# Altium footprint library FootPrintLib_9.PcbLib: 287 footprints (part 6 of 18)
Each footprint in its own frame and in the unit in brackets; x right, y up, seen from the top. Pads: shape width x height; smd on the part's side, far side on the other; paste and mask are expansions set on the pad; w line width, h text height; cw(c..) or ccw(c..) is an arc to the next point about the centre after c.
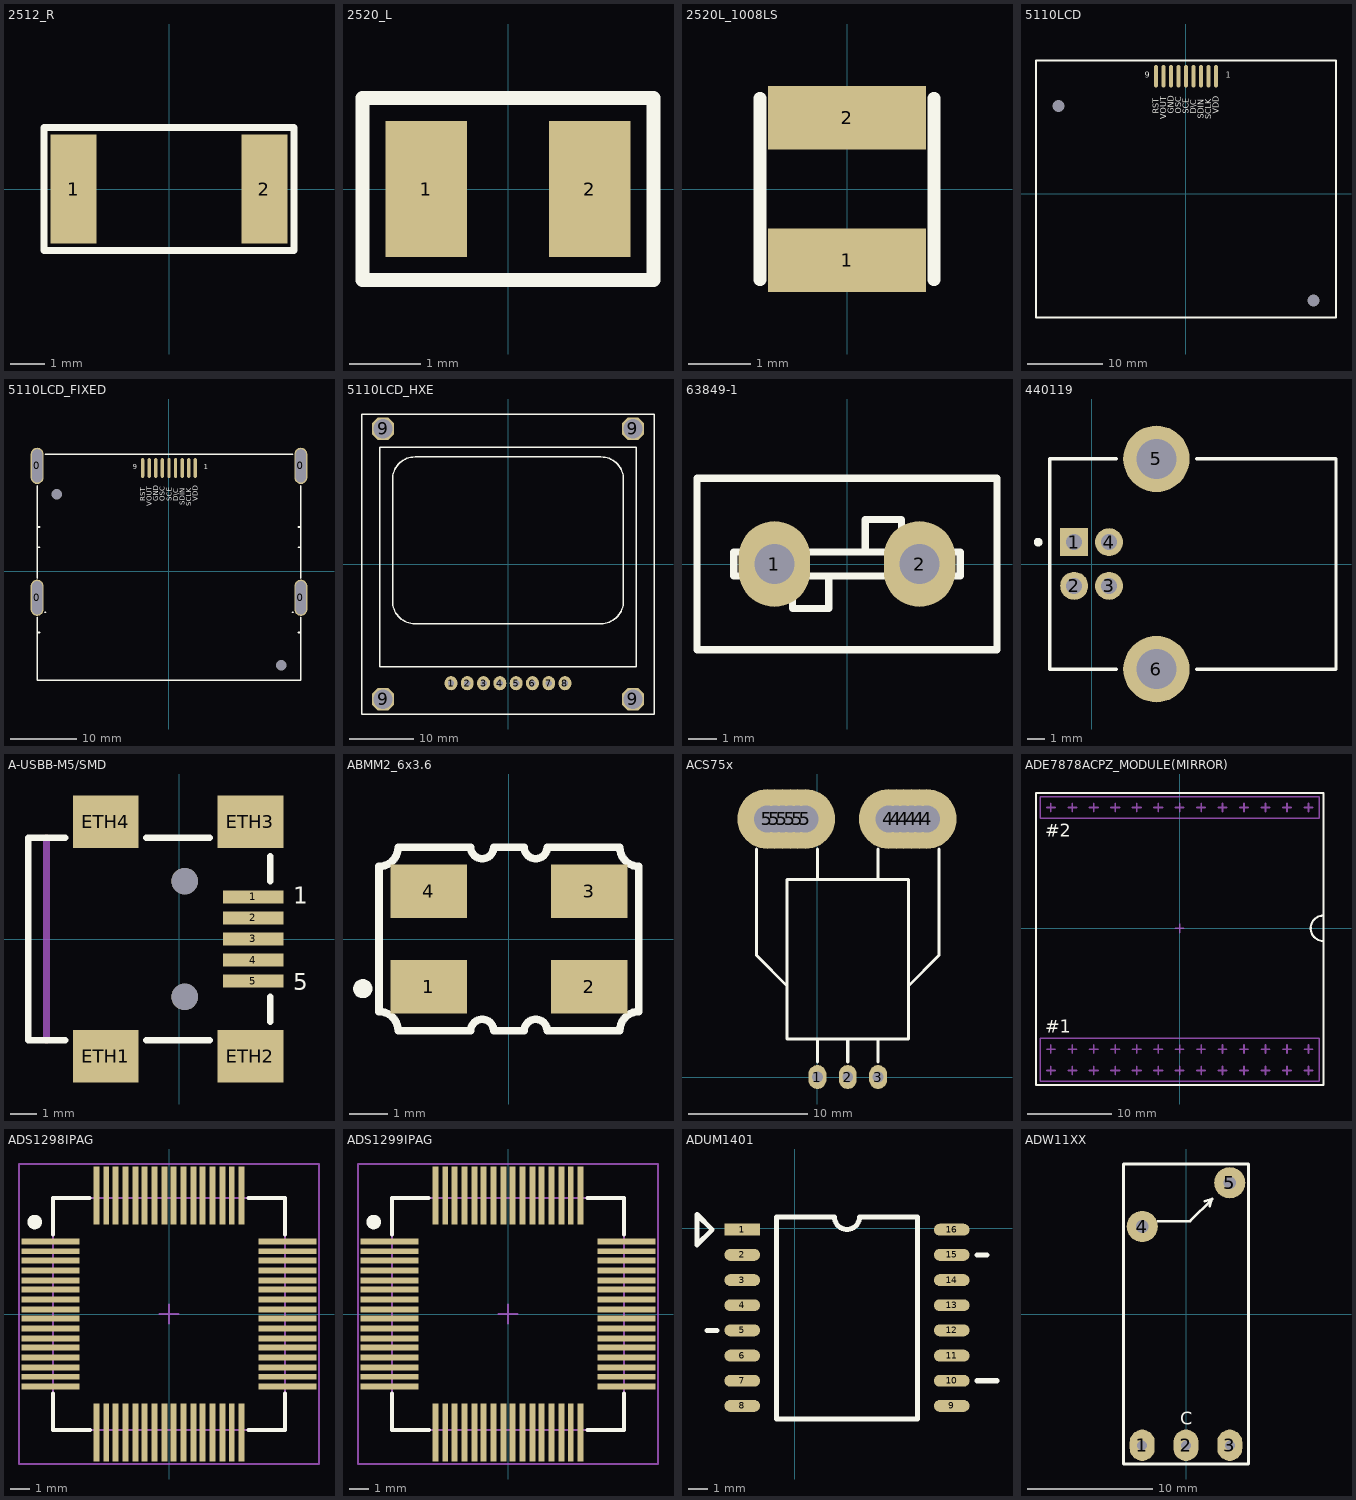
[diagram p5: the footprints below, top view; thin cyan lines are the x and y axes]

## 2512_R [mm] "Resistor"
pads (2):
  rect 1.35x3.2 smd: 1(-2.794,0) 2(2.794,0)
Top Overlay:
  lines w0.2: -3.658,-1.8 -3.658,1.803 3.658,1.803 3.658,-1.8 -3.658,-1.8
3D body "User Library-R_2512.STEP": height 0.6, standoff 0, extent -3.2,-1.6 3.2,1.6

## 2520_L [mil]
pads (2):
  rect 45x75 smd: 1(-45,0) 2(45,0)
Top Overlay:
  lines w7.87: -80,-50 80,-50 80,50 -80,50 -80,-50
3D body "User Library-Chip Resistor2RESC2525X63N.STEP": height 24.8, standoff 0, extent -49.21,-49.21 49.22,49.22

## 2520L_1008LS [mm] "Inductor"
height 2.03
pads (2):
  rect 2.54x1.02 smd: 1(0,-1.145) 2(0,1.145)
Top Overlay:
  lines w0.203: -1.4,-1.46 -1.4,1.46 ; 1.4,-1.46 1.4,1.46
3D body "User Library-Ind1206.STEP": height 1.7, standoff -0.1, extent -0.808,-1.7 0.808,1.7

## 5110LCD [mm]
pads (11):
  round 0 on Mech1 hole 1.6: 0(-16.958,11.689) 0(17.06,-14.215)
  oval 0.5x3 smd: 1(4.06,15.685) 2(3.06,15.685) 3(2.06,15.685) 4(1.06,15.685) 5(0.06,15.685) 6(-0.94,15.685) 7(-1.94,15.685) 8(-2.94,15.685) 9(-3.94,15.685)
Top Overlay:
  lines w0.254: -19.94,-16.515 20.06,-16.515 20.06,17.785 -19.94,17.785 -19.94,-16.515
  text "9" at -5.461,15.494 h0.76
  text "1" at 5.334,15.494 h0.76
  text "RST" at -3.556,10.668 h0.76
  text "VOUT" at -2.556,9.906 h0.76
  text "GND" at -1.556,10.668 h0.76
  text "OSC" at -0.556,10.668 h0.76
  text "SCE" at 0.445,10.668 h0.76
  text "D\C" at 1.445,10.668 h0.76
  text "SDIN" at 2.445,10.033 h0.76
  text "SCLK" at 3.445,9.906 h0.76
  text "VDD" at 4.445,10.668 h0.76
3D body: height 2.8, standoff 0, extent -19.685,-16.256 19.812,17.526

## 5110LCD_FIXED [mm]
pads (15):
  oval 2x5.5 hole 1.5 slot 5 at 90 deg: 0(-19.939,-3.998) 0(-19.939,16.002) 0(20.066,-3.998) 0(20.066,16.002)
  round 0 on Mech1 hole 1.6: 0(-16.958,11.689) 0(17.06,-14.215)
  oval 0.5x3 smd: 1(4.06,15.685) 2(3.06,15.685) 3(2.06,15.685) 4(1.06,15.685) 5(0.06,15.685) 6(-0.94,15.685) 7(-1.94,15.685) 8(-2.94,15.685) 9(-3.94,15.685)
Top Overlay:
  lines w0.254: -19.94,-6.985 -19.94,-16.515 20.06,-16.515 20.06,-6.985 ; -19.94,-1.016 -19.94,12.954 ; -19.939,-9.271 -19.558,-9.271 ; -19.939,3.683 -19.558,3.683 ; -19.939,6.731 -19.558,6.731 ; -18.796,-6.223 -18.669,-6.223 ; -18.669,17.78 18.796,17.78 ; 18.796,-6.223 18.923,-6.223 ; 19.685,-9.271 20.066,-9.271 ; 19.685,3.683 19.939,3.683 ; 19.685,6.731 19.939,6.731 ; 20.06,12.954 20.068,-1.016
  text "9" at -5.461,15.494 h0.76
  text "1" at 5.334,15.494 h0.76
  text "RST" at -3.556,10.668 h0.76
  text "VOUT" at -2.556,9.906 h0.76
  text "GND" at -1.556,10.668 h0.76
  text "OSC" at -0.556,10.668 h0.76
  text "SCE" at 0.445,10.668 h0.76
  text "D\C" at 1.445,10.668 h0.76
  text "SDIN" at 2.445,10.033 h0.76
  text "SCLK" at 3.445,9.906 h0.76
  text "VDD" at 4.445,10.668 h0.76
3D body: height 2.8, standoff 0, extent -19.685,-16.256 19.812,17.526

## 5110LCD_HXE [mm] "LCD Nokia5110 Module 45/6x46/8mm"
height 6.5
pads (12):
  oval 2x2.2 hole 1: 1(-8.89,-18.6) 2(-6.35,-18.6) 3(-3.81,-18.6) 4(-1.27,-18.6) 5(1.27,-18.6) 6(3.81,-18.6) 7(6.35,-18.6) 8(8.89,-18.6)
  oct 3.5x3.5 hole 3: 9(-19.5,-21.1) 9(-19.5,21.1) 9(19.5,-21.1) 9(19.5,21.1)
Top Overlay:
  lines w0.2: -18,-5.815 ccw(c-14.515,-5.815) -14.515,-9.3 14.5,-9.3 ccw(c14.5,-5.8) 18,-5.8 18,13.2 ccw(c14.5,13.2) 14.5,16.7 -14.5,16.7 ccw(c-14.5,13.2) -18,13.2 -18,-5.8 ; -22.8,-23.4 -22.8,23.4 22.8,23.4 22.8,-23.4 -22.8,-23.4 ; -20,-16 20,-16 20,18.2 -20,18.2 -20,-16
3D body: height 1.9, standoff 0, extent 16.3,16.3 16.3,16.3
3D body: height 1.9, standoff 0, extent 16.3,16.3 16.3,16.3
3D body "5110_V3.step": height 7.3, standoff -5.67, extent -22.8,-23.4 22.8,23.4

## 63849-1 [mm] "Terminals TAB .250 PCB"
height 10.21
pads (2):
  oval 2.5x3 hole 1.4: 1(-2.54,0) 2(2.54,0)
Top Overlay:
  lines w0.254: -1.905,-0.42 -1.905,-1.56 -0.635,-1.56 -0.635,-0.42 ; 0.635,0.42 0.635,1.56 1.905,1.56 1.905,0.42 ; -5.25,-3 5.25,-3 5.25,3 -5.25,3 -5.25,-3 ; -3.96,-0.42 3.96,-0.42 3.96,0.42 -3.96,0.42 -3.96,-0.42
3D body "SW3dPS-amp faston tab 63824.STEP": height 10.22, standoff -3.8, extent -3.96,-1.569 3.96,1.521

## 440119 [mm] "Connector; USB1.1, Type B, Thru-Hole; 4 Position; Right Angle"
height 11.05
pads (6):
  rect 1.6x1.6 hole 0.92: 1(-1,1.25)
  round 1.6 hole 0.92: 2(-1,-1.25) 3(1,-1.25) 4(1,1.25)
  round 3.8 hole 2.3: 5(3.71,6.02) 6(3.71,-6.02)
Top Overlay:
  circle w0.25: c-3.06,1.25 r0.125
  lines w0.2: 1.41,-6.02 -2.41,-6.02 -2.41,6.02 1.41,6.02 ; 6.01,-6.02 13.99,-6.02 13.99,6.02 6.01,6.02

## A-USBB-M5/SMD [mm] "Mini-USB B"
height 3.9
pads (11):
  rect 2.3x0.5 smd: 1(2.8,1.6) 2(2.8,0.8) 3(2.8,0) 4(2.8,-0.8) 5(2.8,-1.6)
  round 1 hole 1 unplated: " "(0.2,-2.2) " "(0.2,2.2)
  rect 2.5x2 smd: ETH1(-2.8,-4.45) ETH2(2.7,-4.45) ETH3(2.7,4.45) ETH4(-2.8,4.45)
Top Overlay:
  lines w0.254: -4.35,-3.85 -5.75,-3.85 -5.75,3.85 -4.35,3.85 ; -1.25,-3.85 1.15,-3.85 ; -1.25,3.85 1.15,3.85 ; 3.45,-3.15 3.45,-2.2 ; 3.45,2.2 3.45,3.15
  text "5" at 4.324,-1.956 h0.64
  text "1" at 4.324,1.346 h0.64
Mechanical 15:
  lines w0.254: -5.05,-3.85 -5.05,3.85
3D body "usb_a-usb_b-m5-smd-c.stp": height 4.13, standoff -0.8, extent -5.584,-4.793 3.666,5.107

## ABMM2_6x3.6 [mm] "CERAMIC SURFACE MOUNT  LOW PROFILE QUARTZ CRYSTALS"
height 1.2
pads (4):
  rect 2x1.4 smd mask+0.1: 1(-2.1,-1.25) 2(2.1,-1.25) 3(2.1,1.25) 4(-2.1,1.25)
Top Overlay:
  circle w0.25: c-3.825,-1.3 r0.125
  lines w0.2: -3.4,-1.9 cw(c-3.4,-2.4) -2.9,-2.4 -1,-2.4 cw(c-0.7,-2.4) -0.4,-2.4 0.4,-2.4 cw(c0.7,-2.4) 1,-2.4 2.9,-2.4 cw(c3.4,-2.4) 3.4,-1.9 3.4,1.9 cw(c3.4,2.4) 2.9,2.4 1,2.4 cw(c0.7,2.4) 0.4,2.4 -0.4,2.4 cw(c-0.7,2.4) -1,2.4 -2.9,2.4 cw(c-3.4,2.4) -3.4,1.9 -3.4,-1.9
3D body "User Library-CFPT-9301.STEP": height 1.55, standoff 0, extent -2.5,-1.6 2.5,1.6

## ACS75x [mm] "Current Sensor"
pads (15):
  oval 1.5x2 hole 0.9: 1(0,0) 2(2.54,0) 3(5.08,0)
  round 5 hole 2.25 square: 4(5.969,21.59) 4(9.144,21.59) 5(-4.191,21.59) 5(-1.016,21.59)
  round 5 hole 2.25: 4(6.604,21.59) 4(7.239,21.59) 4(7.874,21.59) 4(8.509,21.59) 5(-3.556,21.59) 5(-2.921,21.59) 5(-2.286,21.59) 5(-1.651,21.59)
Top Overlay:
  lines w0.254: -5.08,19.05 -5.08,10.16 -2.54,7.62 ; 0,1.27 0,3.175 ; 0,16.51 0,19.05 ; 2.54,1.27 2.54,3.175 ; 5.08,1.27 5.08,3.175 ; 5.08,16.51 5.08,19.05 ; 7.62,7.62 10.16,10.16 10.16,19.05 ; -2.54,3.175 -2.54,16.51 7.62,16.51 7.62,3.175 -2.54,3.175

## ADE7878ACPZ_MODULE(MIRROR) [mm]
Top Overlay:
  lines w0.254: 17,-1.5 cw(c17,0) 17,1.5 ; -17,-18.54 17,-18.54 17,16 -17,16 -17,-18.54
  text "#1" at -15.894,-12.389 h1.5
  text "#2" at -15.912,10.807 h1.5
Mechanical 5:
  lines w0.2: -15.74,-16.84 -14.74,-16.84 ; -15.74,-14.3 -14.74,-14.3 ; -15.74,14.3 -14.74,14.3 ; -15.24,-17.34 -15.24,-16.34 ; -15.24,-14.8 -15.24,-13.8 ; -15.24,13.8 -15.24,14.8 ; -13.2,-16.84 -12.2,-16.84 ; -13.2,-14.3 -12.2,-14.3 ; -13.2,14.3 -12.2,14.3 ; -12.7,-17.34 -12.7,-16.34 ; -12.7,-14.8 -12.7,-13.8 ; -12.7,13.8 -12.7,14.8 ; -10.66,-16.84 -9.66,-16.84 ; -10.66,-14.3 -9.66,-14.3 ; -10.66,14.3 -9.66,14.3 ; -10.16,-17.34 -10.16,-16.34 ; -10.16,-14.8 -10.16,-13.8 ; -10.16,13.8 -10.16,14.8 ; -8.12,-16.84 -7.12,-16.84 ; -8.12,-14.3 -7.12,-14.3 ; -8.12,14.3 -7.12,14.3 ; -7.62,-17.34 -7.62,-16.34 ; -7.62,-14.8 -7.62,-13.8 ; -7.62,13.8 -7.62,14.8 ; -5.58,-16.84 -4.58,-16.84 ; -5.58,-14.3 -4.58,-14.3 ; -5.58,14.3 -4.58,14.3 ; -5.08,-17.34 -5.08,-16.34 ; -5.08,-14.8 -5.08,-13.8 ; -5.08,13.8 -5.08,14.8 ; -3.04,-16.84 -2.04,-16.84 ; -3.04,-14.3 -2.04,-14.3 ; -3.04,14.3 -2.04,14.3 ; -2.54,-17.34 -2.54,-16.34 ; -2.54,-14.8 -2.54,-13.8 ; -2.54,13.8 -2.54,14.8 ; -0.5,-16.84 0.5,-16.84 ; -0.5,-14.3 0.5,-14.3 ; -0.5,0 0.5,0 ; -0.5,14.3 0.5,14.3 ; 0,-17.34 0,-16.34 ; 0,-14.8 0,-13.8 ; 0,-0.5 0,0.5 ; 0,13.8 0,14.8 ; 2.04,-16.84 3.04,-16.84 ; 2.04,-14.3 3.04,-14.3 ; 2.04,14.3 3.04,14.3 ; 2.54,-17.34 2.54,-16.34 ; 2.54,-14.8 2.54,-13.8 ; 2.54,13.8 2.54,14.8 ; 4.58,-16.84 5.58,-16.84 ; 4.58,-14.3 5.58,-14.3 ; 4.58,14.3 5.58,14.3 ; 5.08,-17.34 5.08,-16.34 ; 5.08,-14.8 5.08,-13.8 ; 5.08,13.8 5.08,14.8 ; 7.12,-16.84 8.12,-16.84 ; 7.12,-14.3 8.12,-14.3 ; 7.12,14.3 8.12,14.3 ; 7.62,-17.34 7.62,-16.34 ; 7.62,-14.8 7.62,-13.8 ; 7.62,13.8 7.62,14.8 ; 9.66,-16.84 10.66,-16.84 ; 9.66,-14.3 10.66,-14.3 ; 9.66,14.3 10.66,14.3 ; 10.16,-17.34 10.16,-16.34 ; 10.16,-14.8 10.16,-13.8 ; 10.16,13.8 10.16,14.8 ; 12.2,-16.84 13.2,-16.84 ; 12.2,-14.3 13.2,-14.3 ; 12.2,14.3 13.2,14.3 ; 12.7,-17.34 12.7,-16.34 ; 12.7,-14.8 12.7,-13.8 ; 12.7,13.8 12.7,14.8 ; 14.74,-16.84 15.74,-16.84 ; 14.74,-14.3 15.74,-14.3 ; 14.74,14.3 15.74,14.3 ; 15.24,-17.34 15.24,-16.34 ; 15.24,-14.8 15.24,-13.8 ; 15.24,13.8 15.24,14.8 ; -16.51,-18.11 -16.51,-13.03 16.51,-13.03 16.51,-18.11 -16.51,-18.11 ; -16.51,13.03 16.51,13.03 16.51,15.57 -16.51,15.57 -16.51,13.03

## ADS1298IPAG [mil] "ADS1298IPAG"
height 41.34
pads (64):
  rect 118x12 smd: 1(-240.5,147.5) 2(-240.5,127.5) 3(-240.5,108.5) 4(-240.5,88.5) 5(-240.5,68.5) 6(-240.5,49.5) 7(-240.5,29.5) 8(-240.5,9.5) 9(-240.5,-9.5) 10(-240.5,-29.5) 11(-240.5,-49.5) 12(-240.5,-68.5) 13(-240.5,-88.5) 14(-240.5,-108.5) 15(-240.5,-127.5) 16(-240.5,-147.5) 33(240.5,-147.5) 34(240.5,-127.5) 35(240.5,-108.5) 36(240.5,-88.5) 37(240.5,-68.5) 38(240.5,-49.5) 39(240.5,-29.5) 40(240.5,-9.5) 41(240.5,9.5) 42(240.5,29.5) 43(240.5,49.5) 44(240.5,68.5) 45(240.5,88.5) 46(240.5,108.5) 47(240.5,127.5) 48(240.5,147.5)
  rect 12x118 smd: 17(-147.5,-240.5) 18(-127.5,-240.5) 19(-108.5,-240.5) 20(-88.5,-240.5) 21(-68.5,-240.5) 22(-49.5,-240.5) 23(-29.5,-240.5) 24(-9.5,-240.5) 25(9.5,-240.5) 26(29.5,-240.5) 27(49.5,-240.5) 28(68.5,-240.5) 29(88.5,-240.5) 30(108.5,-240.5) 31(127.5,-240.5) 32(147.5,-240.5) 49(147.5,240.5) 50(127.5,240.5) 51(108.5,240.5) 52(88.5,240.5) 53(68.5,240.5) 54(49.5,240.5) 55(29.5,240.5) 56(9.5,240.5) 57(-9.5,240.5) 58(-29.5,240.5) 59(-49.5,240.5) 60(-68.5,240.5) 61(-88.5,240.5) 62(-108.5,240.5) 63(-127.5,240.5) 64(-147.5,240.5)
Top Overlay:
  circle w19.68: c-273,187 r4.92
  lines w7.87: -236.22,-161.22 -236.22,-236.22 -160,-236.22 ; -236.22,161.22 -236.22,236.22 -161.22,236.22 ; 161.22,-236.22 236.22,-236.22 236.22,-161.22 ; 161.22,236.22 236.22,236.22 236.22,161.22
Mechanical 13:
  lines w3.94: -236.22,-236.22 -236.22,236.22 236.22,236.22 236.22,-236.22 -236.22,-236.22
Mechanical 15:
  lines w3.94: -19.69,0 19.68,0 ; 0,-19.68 0,19.69 ; -305,-305 -305,305 305,305 305,-305 -305,-305
3D body "User Library-QFP-64.step": height 53.15, standoff 0, extent -236.77,-236.76 236.77,236.77

## ADS1299IPAG [mil] "ADS1299IPAG,Low-Noise, 8-Channel, 24-Bit Analog Front-End for Biopotential Measurements"
height 41.34
pads (64):
  rect 118x12 smd: 1(-240.5,147.5) 2(-240.5,127.5) 3(-240.5,108.5) 4(-240.5,88.5) 5(-240.5,68.5) 6(-240.5,49.5) 7(-240.5,29.5) 8(-240.5,9.5) 9(-240.5,-9.5) 10(-240.5,-29.5) 11(-240.5,-49.5) 12(-240.5,-68.5) 13(-240.5,-88.5) 14(-240.5,-108.5) 15(-240.5,-127.5) 16(-240.5,-147.5) 33(240.5,-147.5) 34(240.5,-127.5) 35(240.5,-108.5) 36(240.5,-88.5) 37(240.5,-68.5) 38(240.5,-49.5) 39(240.5,-29.5) 40(240.5,-9.5) 41(240.5,9.5) 42(240.5,29.5) 43(240.5,49.5) 44(240.5,68.5) 45(240.5,88.5) 46(240.5,108.5) 47(240.5,127.5) 48(240.5,147.5)
  rect 12x118 smd: 17(-147.5,-240.5) 18(-127.5,-240.5) 19(-108.5,-240.5) 20(-88.5,-240.5) 21(-68.5,-240.5) 22(-49.5,-240.5) 23(-29.5,-240.5) 24(-9.5,-240.5) 25(9.5,-240.5) 26(29.5,-240.5) 27(49.5,-240.5) 28(68.5,-240.5) 29(88.5,-240.5) 30(108.5,-240.5) 31(127.5,-240.5) 32(147.5,-240.5) 49(147.5,240.5) 50(127.5,240.5) 51(108.5,240.5) 52(88.5,240.5) 53(68.5,240.5) 54(49.5,240.5) 55(29.5,240.5) 56(9.5,240.5) 57(-9.5,240.5) 58(-29.5,240.5) 59(-49.5,240.5) 60(-68.5,240.5) 61(-88.5,240.5) 62(-108.5,240.5) 63(-127.5,240.5) 64(-147.5,240.5)
Top Overlay:
  circle w19.68: c-273,187 r4.92
  lines w7.87: -236.22,-161.22 -236.22,-236.22 -160,-236.22 ; -236.22,161.22 -236.22,236.22 -161.22,236.22 ; 161.22,-236.22 236.22,-236.22 236.22,-161.22 ; 161.22,236.22 236.22,236.22 236.22,161.22
Mechanical 13:
  lines w3.94: -236.22,-236.22 -236.22,236.22 236.22,236.22 236.22,-236.22 -236.22,-236.22
Mechanical 15:
  lines w3.94: -19.69,0 19.68,0 ; 0,-19.68 0,19.69 ; -305,-305 -305,305 305,305 305,-305 -305,-305
3D body "User Library-QFP-64.step": height 53.15, standoff 0, extent -236.77,-236.76 236.77,236.77

## ADUM1401 [mm] "ADUM1401"
pads (16):
  rect 1.8x0.6 smd: 1(-2.65,-0.083)
  oval 1.8x0.6 smd: 2(-2.65,-1.353) 3(-2.65,-2.623) 4(-2.65,-3.893) 5(-2.65,-5.163) 6(-2.65,-6.433) 7(-2.65,-7.703) 8(-2.65,-8.973) 9(7.91,-8.973) 10(7.91,-7.703) 11(7.91,-6.433) 12(7.91,-5.163) 13(7.91,-3.893) 14(7.91,-2.623) 15(7.91,-1.353) 16(7.91,-0.083)
Top Overlay:
  lines w0.254: -4.428,-5.163 -3.92,-5.163 ; 9.18,-7.703 10.196,-7.703 ; 9.18,-1.353 9.688,-1.353 ; -4.936,-0.845 -4.936,0.679 -4.174,-0.083 -4.936,-0.845 ; -0.915,-9.623 -0.915,0.567 1.995,0.567 ccw(c2.63,0.567) 3.265,0.567 6.175,0.567 6.175,-9.623 -0.915,-9.623

## ADW11XX [mm]
height 24.6
pads (5):
  oval 2x2.5 hole 0.8: 1(-3.5,-10.5) 2(0,-10.5) 3(3.5,-10.5)
  round 2.5 hole 1: 4(-3.5,7) 5(3.5,10.5)
Top Overlay:
  lines w0.198: -2.281,7.432 0.335,7.432 2.113,9.21 ; 1.504,9.007 2.113,9.21 ; 1.91,8.626 2.069,9.196 2.113,9.21
  lines w0.254: -5,-12 -5,12 5,12 5,-12 -5,-12
  text "C" at -0.477,-8.849 h1.02